# Altium footprint library 1.10-电容.PcbLib: 193 footprints (part 6 of 13)
Each footprint in its own frame and in the unit in brackets; x right, y up, seen from the top. Pads: shape width x height; smd on the part's side, far side on the other; paste and mask are expansions set on the pad; w line width, h text height; cw(c..) or ccw(c..) is an arc to the next point about the centre after c.
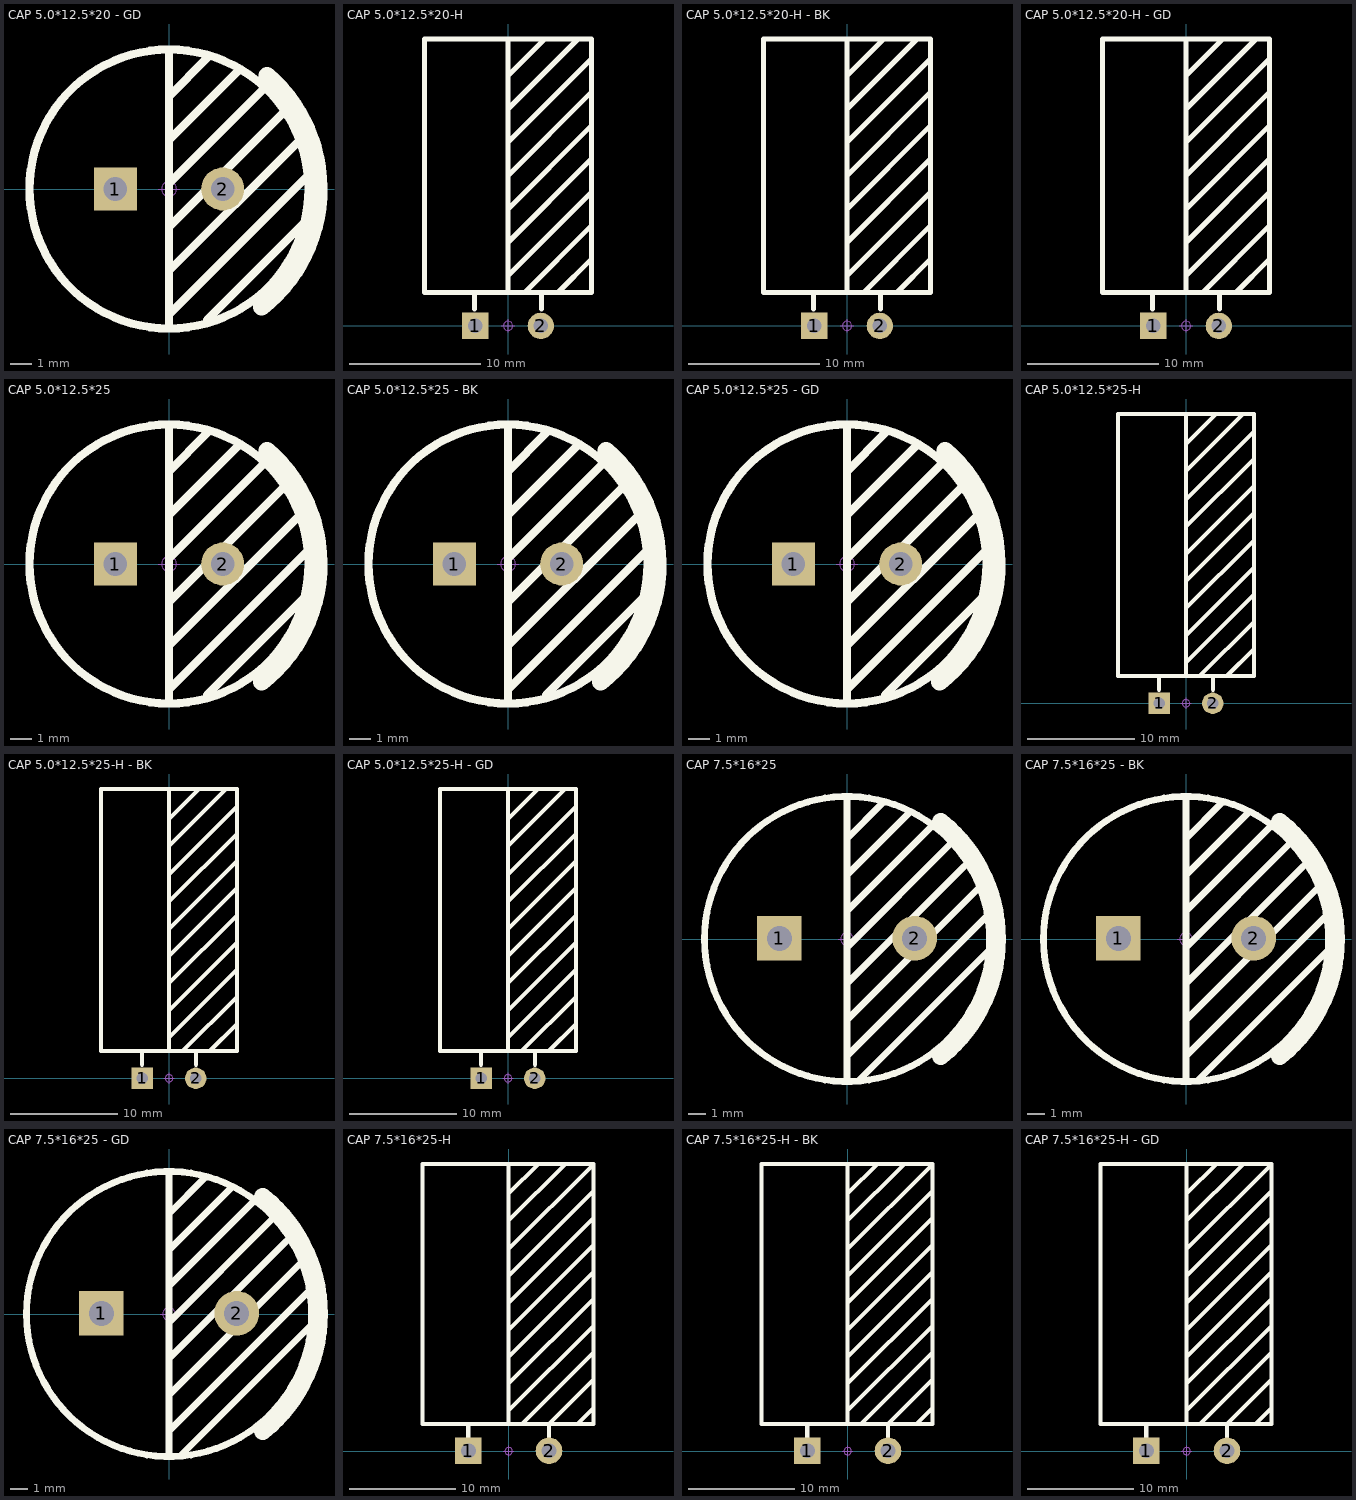
[diagram p5: the footprints below, top view; thin cyan lines are the x and y axes]

## CAP 5.0*12.5*20 - GD [mm] "脚距5mm直径12.5mm高度20mm"
pads (2):
  rect 2x2 hole 1.1: 1(-2.5,0)
  round 2 hole 1.1: 2(2.5,0)
Top Overlay:
  circle w0.381: c0,0 r6.5
  lines w0.381: 0,-5.08 0,-3.81 6.096,2.286 ; 0,-2.54 0,-1.778 5.334,3.556 ; 0,0 0,0.254 4.318,4.572 ; 0,1.016 0,2.286 3.302,5.588 ; 0,3.048 0,4.064 ; 0,4.318 1.778,6.096 ; 0,6.35 0,-6.35 0,-5.842 6.35,0.508 ; 1.778,-6.096 6.35,-1.524
  lines w0.8: 4.307,-5.503 ccw(c0,0) 4.568,5.289
Mechanical 15:
  circle w0.05: c0,0 r0.35
  lines w0.05: -0.5,0 0.5,0 ; 0,-0.5 0,0.5
3D body "CAP 5X12.5X20.STEP": height 20.04, standoff -3.37, extent -6.25,-6.248 6.26,6.248

## CAP 5.0*12.5*20-H [mm] "脚距5mm直径12.5mm高度20mm"
pads (2):
  rect 2x2 hole 1.1: 1(-2.5,0)
  round 2 hole 1.1: 2(2.5,0)
Top Overlay:
  lines w0.381: -2.54,1.27 -2.54,2.54 ; 0,2.54 0,21.844 ; 0,3.81 6.35,10.16 ; 0,6.35 6.35,12.7 ; 0,8.89 6.35,15.24 ; 0,11.43 6.35,17.78 ; 0,13.97 6.35,20.32 ; 0,16.51 5.334,21.844 ; 0,19.05 2.794,21.844 ; 1.27,2.54 6.35,7.62 ; 2.54,1.27 2.54,2.54 ; 3.81,2.54 6.35,5.08 ; -6.35,2.54 -6.35,21.844 6.35,21.844 6.35,2.54 -6.35,2.54
Mechanical 15:
  circle w0.05: c0,0 r0.35
  lines w0.05: -0.5,0 0.5,0 ; 0,-0.5 0,0.5
3D body "CAP 5X12.5X20-H.STEP": height 12.53, standoff -3.47, extent -6.25,-0.3 6.26,21.91

## CAP 5.0*12.5*20-H - BK [mm] "脚距5mm直径12.5mm高度20mm"
pads (2):
  rect 2x2 hole 1.1: 1(-2.5,0)
  round 2 hole 1.1: 2(2.5,0)
Top Overlay:
  lines w0.381: -2.54,1.27 -2.54,2.54 ; 0,2.54 0,21.844 ; 0,3.81 6.35,10.16 ; 0,6.35 6.35,12.7 ; 0,8.89 6.35,15.24 ; 0,11.43 6.35,17.78 ; 0,13.97 6.35,20.32 ; 0,16.51 5.334,21.844 ; 0,19.05 2.794,21.844 ; 1.27,2.54 6.35,7.62 ; 2.54,1.27 2.54,2.54 ; 3.81,2.54 6.35,5.08 ; -6.35,2.54 -6.35,21.844 6.35,21.844 6.35,2.54 -6.35,2.54
Mechanical 15:
  circle w0.05: c0,0 r0.35
  lines w0.05: -0.5,0 0.5,0 ; 0,-0.5 0,0.5
3D body "CAP 5X12.5X20-H.STEP": height 12.53, standoff -3.48, extent -6.25,-0.3 6.26,21.91

## CAP 5.0*12.5*20-H - GD [mm] "脚距5mm直径12.5mm高度20mm"
pads (2):
  rect 2x2 hole 1.1: 1(-2.5,0)
  round 2 hole 1.1: 2(2.5,0)
Top Overlay:
  lines w0.381: -2.54,1.27 -2.54,2.54 ; 0,2.54 0,21.844 ; 0,3.81 6.35,10.16 ; 0,6.35 6.35,12.7 ; 0,8.89 6.35,15.24 ; 0,11.43 6.35,17.78 ; 0,13.97 6.35,20.32 ; 0,16.51 5.334,21.844 ; 0,19.05 2.794,21.844 ; 1.27,2.54 6.35,7.62 ; 2.54,1.27 2.54,2.54 ; 3.81,2.54 6.35,5.08 ; -6.35,2.54 6.35,2.54 6.35,21.844 -6.35,21.844 -6.35,2.54
Mechanical 15:
  circle w0.05: c0,0 r0.35
  lines w0.05: -0.5,0 0.5,0 ; 0,-0.5 0,0.5
3D body "CAP 5X12.5X20-H.STEP": height 12.53, standoff -3.48, extent -6.25,-0.3 6.26,21.91

## CAP 5.0*12.5*25 [mm] "脚距5mm直径12.5mm高度25mm                淘宝ID:黄晶宝石"
pads (2):
  rect 2x2 hole 1.1: 1(-2.5,0)
  round 2 hole 1.1: 2(2.5,0)
Top Overlay:
  circle w0.381: c0,0 r6.5
  lines w0.381: 0,-5.08 0,-3.81 6.096,2.286 ; 0,-2.54 0,-1.778 5.334,3.556 ; 0,0 0,0.254 4.318,4.572 ; 0,1.016 0,2.286 3.302,5.588 ; 0,3.048 0,4.064 ; 0,4.318 1.778,6.096 ; 0,6.35 0,-6.35 0,-5.842 6.35,0.508 ; 1.778,-6.096 6.35,-1.524
  lines w0.8: 4.307,-5.503 ccw(c0,0) 4.568,5.289
Mechanical 15:
  circle w0.05: c0,0 r0.35
  lines w0.05: -0.5,0 0.5,0 ; 0,-0.5 0,0.5
3D body "CAP 5X12.5X25.STEP": height 25.04, standoff -3.37, extent -6.25,-6.249 6.26,6.249

## CAP 5.0*12.5*25 - BK [mm] "脚距5mm直径12.5mm高度25mm"
pads (2):
  rect 2x2 hole 1.1: 1(-2.5,0)
  round 2 hole 1.1: 2(2.5,0)
Top Overlay:
  circle w0.381: c0,0 r6.5
  lines w0.381: 0,-5.08 0,-3.81 6.096,2.286 ; 0,-2.54 0,-1.778 5.334,3.556 ; 0,0 0,0.254 4.318,4.572 ; 0,1.016 0,2.286 3.302,5.588 ; 0,3.048 0,4.064 ; 0,4.318 1.778,6.096 ; 0,6.35 0,-6.35 0,-5.842 6.35,0.508 ; 1.778,-6.096 6.35,-1.524
  lines w0.8: 4.307,-5.503 ccw(c0,0) 4.568,5.289
Mechanical 15:
  circle w0.05: c0,0 r0.35
  lines w0.05: -0.5,0 0.5,0 ; 0,-0.5 0,0.5
3D body "CAP 5X12.5X25.STEP": height 25.04, standoff -3.37, extent -6.25,-6.249 6.26,6.249

## CAP 5.0*12.5*25 - GD [mm] "脚距5mm直径12.5mm高度25mm"
pads (2):
  rect 2x2 hole 1.1: 1(-2.5,0)
  round 2 hole 1.1: 2(2.5,0)
Top Overlay:
  circle w0.381: c0,0 r6.5
  lines w0.381: 0,-5.08 0,-3.81 6.096,2.286 ; 0,-2.54 0,-1.778 5.334,3.556 ; 0,0 0,0.254 4.318,4.572 ; 0,1.016 0,2.286 3.302,5.588 ; 0,3.048 0,4.064 ; 0,4.318 1.778,6.096 ; 0,6.35 0,-6.35 0,-5.842 6.35,0.508 ; 1.778,-6.096 6.35,-1.524
  lines w0.8: 4.307,-5.503 ccw(c0,0) 4.568,5.289
Mechanical 15:
  circle w0.05: c0,0 r0.35
  lines w0.05: -0.5,0 0.5,0 ; 0,-0.5 0,0.5
3D body "CAP 5X12.5X25.STEP": height 25.06, standoff -3.35, extent -6.239,-6.244 6.271,6.254

## CAP 5.0*12.5*25-H [mm] "脚距5mm直径12.5mm高度25mm"
pads (2):
  rect 2x2 hole 1.1: 1(-2.5,0)
  round 2 hole 1.1: 2(2.5,0)
Top Overlay:
  lines w0.381: -2.54,1.27 -2.54,2.54 ; 0,2.54 0,27.051 ; 0,3.81 6.35,10.16 ; 0,6.35 6.35,12.7 ; 0,8.89 6.35,15.24 ; 0,11.43 6.35,17.78 ; 0,13.97 6.35,20.32 ; 0,16.51 6.35,22.86 ; 0,19.05 6.35,25.4 ; 0,21.717 5.334,27.051 ; 0,24.257 2.794,27.051 ; 1.27,2.54 6.35,7.62 ; 2.54,1.27 2.54,2.54 ; 3.81,2.54 6.35,5.08 ; -6.35,2.54 6.35,2.54 6.35,27.051 -6.35,27.051 -6.35,2.54
Mechanical 15:
  circle w0.05: c0,0 r0.35
  lines w0.05: -0.5,0 0.5,0 ; 0,-0.5 0,0.5
3D body "CAP 5X12.5X25-H.STEP": height 12.53, standoff -3.47, extent -6.25,-0.3 6.26,26.91

## CAP 5.0*12.5*25-H - BK [mm] "脚距5mm直径12.5mm高度25mm"
pads (2):
  rect 2x2 hole 1.1: 1(-2.5,0)
  round 2 hole 1.1: 2(2.5,0)
Top Overlay:
  lines w0.381: -2.54,1.27 -2.54,2.54 ; 0,2.54 0,27.051 ; 0,3.81 6.35,10.16 ; 0,6.35 6.35,12.7 ; 0,8.89 6.35,15.24 ; 0,11.43 6.35,17.78 ; 0,13.97 6.35,20.32 ; 0,16.51 6.35,22.86 ; 0,19.05 6.35,25.4 ; 0,21.717 5.334,27.051 ; 0,24.257 2.794,27.051 ; 1.27,2.54 6.35,7.62 ; 2.54,1.27 2.54,2.54 ; 3.81,2.54 6.35,5.08 ; -6.35,2.54 -6.35,27.051 6.35,27.051 6.35,2.54 -6.35,2.54
Mechanical 15:
  circle w0.05: c0,0 r0.35
  lines w0.05: -0.5,0 0.5,0 ; 0,-0.5 0,0.5
3D body "CAP 5X12.5X25-H.STEP": height 12.53, standoff -3.48, extent -6.25,-0.3 6.26,26.91

## CAP 5.0*12.5*25-H - GD [mm] "脚距5mm直径12.5mm高度25mm"
pads (2):
  rect 2x2 hole 1.1: 1(-2.5,0)
  round 2 hole 1.1: 2(2.5,0)
Top Overlay:
  lines w0.381: -2.54,1.27 -2.54,2.54 ; 0,2.54 0,27.051 ; 0,3.81 6.35,10.16 ; 0,6.35 6.35,12.7 ; 0,8.89 6.35,15.24 ; 0,11.43 6.35,17.78 ; 0,13.97 6.35,20.32 ; 0,16.51 6.35,22.86 ; 0,19.05 6.35,25.4 ; 0,21.717 5.334,27.051 ; 0,24.257 2.794,27.051 ; 1.27,2.54 6.35,7.62 ; 2.54,1.27 2.54,2.54 ; 3.81,2.54 6.35,5.08 ; -6.35,2.54 -6.35,27.051 6.35,27.051 6.35,2.54 -6.35,2.54
Mechanical 15:
  circle w0.05: c0,0 r0.35
  lines w0.05: -0.5,0 0.5,0 ; 0,-0.5 0,0.5
3D body "CAP 5X12.5X25-H.STEP": height 12.53, standoff -3.48, extent -6.25,-0.3 6.26,26.91

## CAP 7.5*16*25 [mm] "脚距7.5mm直径16mm高度25mm"
pads (2):
  rect 2.5x2.5 hole 1.4: 1(-3.8,0.038)
  round 2.5 hole 1.4: 2(3.8,0.038)
Top Overlay:
  circle w0.381: c0,0 r8
  lines w0.381: 0,-7.963 0,7.963 ; 0,-6.566 7.874,1.308 ; 0,-4.534 7.366,2.832 ; 0,-2.502 6.604,4.102 ; 0,-0.47 5.905,5.436 ; 0,1.562 4.826,6.388 ; 0,3.594 3.556,7.15 ; 0,5.626 2.032,7.658 ; 0.66,-7.938 7.938,-0.66
  lines w1: 5.259,-6.574 ccw(c0,0) 5.259,6.574
Mechanical 15:
  circle w0.05: c0,0 r0.35
  lines w0.05: -0.5,0 0.5,0 ; 0,-0.5 0,0.5
3D body "CAP 7.5X16X25.STEP": height 25.03, standoff -3.38, extent -8,-7.999 8.01,7.999

## CAP 7.5*16*25 - BK [mm] "脚距7.5mm直径16mm高度25mm"
pads (2):
  rect 2.5x2.5 hole 1.4: 1(-3.8,0.038)
  round 2.5 hole 1.4: 2(3.8,0.038)
Top Overlay:
  circle w0.381: c0,0 r8
  lines w0.381: 0,-7.963 0,7.963 ; 0,-6.566 7.874,1.308 ; 0,-4.534 7.366,2.832 ; 0,-2.502 6.604,4.102 ; 0,-0.47 5.905,5.436 ; 0,1.562 4.826,6.388 ; 0,3.594 3.556,7.15 ; 0,5.626 2.032,7.658 ; 0.66,-7.938 7.938,-0.66
  lines w1: 5.259,-6.574 ccw(c0,0) 5.259,6.574
Mechanical 15:
  circle w0.05: c0,0 r0.35
  lines w0.05: -0.5,0 0.5,0 ; 0,-0.5 0,0.5
3D body "CAP 7.5X16X25.STEP": height 25.04, standoff -3.37, extent -8,-7.999 8.01,7.999

## CAP 7.5*16*25 - GD [mm] "脚距7.5mm直径16mm高度25mm"
pads (2):
  rect 2.5x2.5 hole 1.4: 1(-3.8,0.038)
  round 2.5 hole 1.4: 2(3.8,0.038)
Top Overlay:
  circle w0.381: c0,0 r8
  lines w0.381: 0,-7.963 0,7.963 ; 0,-6.566 7.874,1.308 ; 0,-4.534 7.366,2.832 ; 0,-2.502 6.604,4.102 ; 0,-0.47 5.905,5.436 ; 0,1.562 4.826,6.388 ; 0,3.594 3.556,7.15 ; 0,5.626 2.032,7.658 ; 0.66,-7.938 7.938,-0.66
  lines w1: 5.259,-6.574 ccw(c0,0) 5.259,6.574
Mechanical 15:
  circle w0.05: c0,0 r0.35
  lines w0.05: -0.5,0 0.5,0 ; 0,-0.5 0,0.5
3D body "CAP 7.5X16X25.STEP": height 25.04, standoff -3.37, extent -8,-7.999 8.01,7.999

## CAP 7.5*16*25-H [mm] "脚距7.5mm直径16mm高度25mm            淘宝ID:黄晶宝石"
pads (2):
  rect 2.5x2.5 hole 1.4: 1(-3.8,0.038)
  round 2.5 hole 1.4: 2(3.8,0.038)
Top Overlay:
  lines w0.381: -3.81,1.27 -3.81,2.54 ; 0,2.54 0,27.051 ; 0,3.81 8.001,11.811 ; 0,6.35 8.001,14.351 ; 0,8.89 8.001,16.891 ; 0,11.43 8.001,19.431 ; 0,13.97 7.938,21.907 ; 0,16.51 7.938,24.447 ; 0,19.05 7.929,26.979 ; 0,21.717 5.334,27.051 ; 0,24.257 2.794,27.051 ; 1.27,2.54 8.001,9.271 ; 3.81,1.27 3.81,2.54 8.001,6.731 ; 6.477,2.54 8.001,4.064 ; -8.128,2.54 -8.128,27.051 8.001,27.051 8.001,2.54 -8.128,2.54
Mechanical 15:
  circle w0.05: c0,0 r0.35
  lines w0.05: -0.5,0 0.5,0 ; 0,-0.5 0,0.5
3D body "CAP 7.5X16X25-H.STEP": height 16.03, standoff -3.47, extent -8.05,-0.462 7.96,26.948

## CAP 7.5*16*25-H - BK [mm] "脚距7.5mm直径16mm高度25mm"
pads (2):
  rect 2.5x2.5 hole 1.4: 1(-3.8,0.038)
  round 2.5 hole 1.4: 2(3.8,0.038)
Top Overlay:
  lines w0.381: -3.81,1.27 -3.81,2.54 ; 0,2.54 0,27.051 ; 0,3.81 8.001,11.811 ; 0,6.35 8.001,14.351 ; 0,8.89 8.001,16.891 ; 0,11.43 8.001,19.431 ; 0,13.97 7.938,21.907 ; 0,16.51 7.938,24.447 ; 0,19.05 7.929,26.979 ; 0,21.717 5.334,27.051 ; 0,24.257 2.794,27.051 ; 1.27,2.54 8.001,9.271 ; 3.81,1.27 3.81,2.54 8.001,6.731 ; 6.477,2.54 8.001,4.064 ; -8.128,2.54 8.001,2.54 8.001,27.051 -8.128,27.051 -8.128,2.54
Mechanical 15:
  circle w0.05: c0,0 r0.35
  lines w0.05: -0.5,0 0.5,0 ; 0,-0.5 0,0.5
3D body "CAP 7.5X16X25-H.STEP": height 16.03, standoff -3.48, extent -8.05,-0.462 7.96,26.948

## CAP 7.5*16*25-H - GD [mm] "脚距7.5mm直径16mm高度25mm"
pads (2):
  rect 2.5x2.5 hole 1.4: 1(-3.8,0.038)
  round 2.5 hole 1.4: 2(3.8,0.038)
Top Overlay:
  lines w0.381: -3.81,1.27 -3.81,2.54 ; 0,2.54 0,27.051 ; 0,3.81 8.001,11.811 ; 0,6.35 8.001,14.351 ; 0,8.89 8.001,16.891 ; 0,11.43 8.001,19.431 ; 0,13.97 7.938,21.907 ; 0,16.51 7.938,24.447 ; 0,19.05 7.929,26.979 ; 0,21.717 5.334,27.051 ; 0,24.257 2.794,27.051 ; 1.27,2.54 8.001,9.271 ; 3.81,1.27 3.81,2.54 8.001,6.731 ; 6.477,2.54 8.001,4.064 ; -8.128,2.54 8.001,2.54 8.001,27.051 -8.128,27.051 -8.128,2.54
Mechanical 15:
  circle w0.05: c0,0 r0.35
  lines w0.05: -0.5,0 0.5,0 ; 0,-0.5 0,0.5
3D body "CAP 7.5X16X25-H.STEP": height 16.03, standoff -3.48, extent -8.05,-0.462 7.96,26.948